# Altium footprint library Capacitor.PcbLib: 73 footprints (part 2 of 5)
Each footprint in its own frame and in the unit in brackets; x right, y up, seen from the top. Pads: shape width x height; smd on the part's side, far side on the other; paste and mask are expansions set on the pad; w line width, h text height; cw(c..) or ccw(c..) is an arc to the next point about the centre after c.
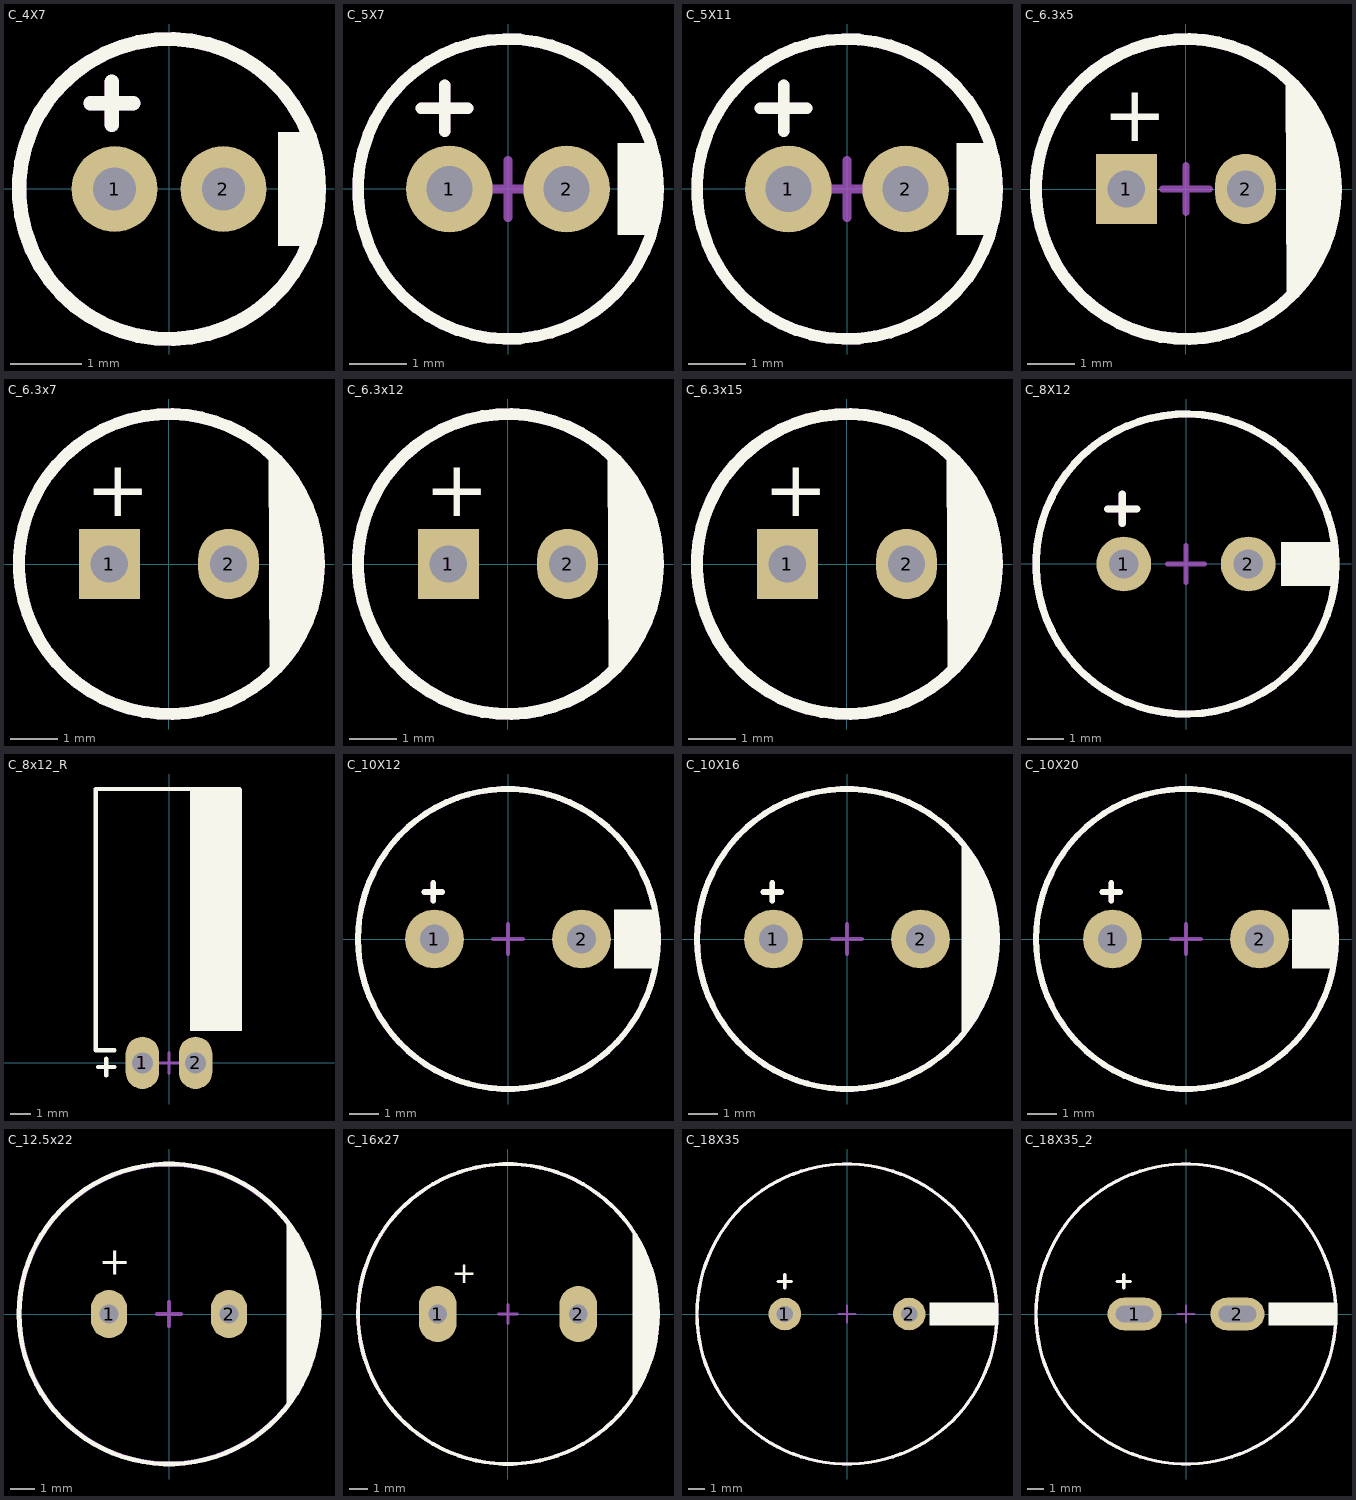
[diagram p1: the footprints below, top view; thin cyan lines are the x and y axes]

## C_4X7 [mm] "Cap Elec, D4.0X7.0H pitch: 1.5mm"
height 7
pads (2):
  round 1.2 hole 0.6: 1(-0.762,0) 2(0.762,0)
Top Overlay:
  circle w0.2: c0,0 r2.1
  rectangle: 1.524,-0.8 2.046,0.8
  lines w0.2: -1.1,1.2 -0.5,1.2 ; -0.8,0.9 -0.8,1.5
Top Designator:
  text ".Designator" at -3.71,-0.344 h1.52
Mechanical 15:
  circle w0.2: c0,0 r2.1
  lines w0.2: -1.1,1.2 -0.5,1.2 ; -0.8,0.9 -0.8,1.5
3D body "ElCapVT-1.5-4x7-black.step": height 7, standoff -3, extent -1.99,-1.99 2.001,1.99

## C_5X7 [mm] "Cap Elec, D5.0X7.0H pitch: 2mm"
height 7
pads (2):
  round 1.5 hole 0.8: 1(-1.016,0) 2(1.016,0)
Top Overlay:
  circle w0.2: c0,0 r2.6
  rectangle: 1.9,-0.8 2.54,0.8
  lines w0.2: -1.5,1.4 -0.7,1.4 ; -1.1,1 -1.1,1.8
Top Designator:
  text ".Designator" at -3.71,-0.344 h1.52
Mechanical 12:
  lines w0.15: -0.5,0 0.5,0 ; 0,-0.5 0,0.5
Mechanical 15:
  circle w0.2: c0,0 r2.6
  lines w0.2: -1.5,1.4 -0.7,1.4 ; -1.1,1 -1.1,1.8
3D body "ElCapVT-2.0-5x7-black.step": height 7.1, standoff -2.9, extent -2.5,-2.499 2.501,2.499

## C_5X11 [mm] "Cap Elec, D5.0X11.0H pitch: 2mm"
height 11
pads (2):
  round 1.5 hole 0.8: 1(-1.016,0) 2(1.016,0)
Top Overlay:
  circle w0.2: c0,0 r2.6
  rectangle: 1.9,-0.8 2.54,0.8
  lines w0.2: -1.5,1.4 -0.7,1.4 ; -1.1,1 -1.1,1.8
Top Designator:
  text ".Designator" at -3.71,-0.344 h1.52
Mechanical 12:
  lines w0.15: -0.5,0 0.5,0 ; 0,-0.5 0,0.5
Mechanical 15:
  circle w0.2: c0,0 r2.6
  lines w0.2: -1.5,1.4 -0.7,1.4 ; -1.1,1 -1.1,1.8
3D body "ElCapVT-2.0-5x11-black.step": height 11.01, standoff -2.99, extent -2.5,-2.499 2.501,2.499

## C_6.3x5 [mm] "pitch 2.5mm"
pads (2):
  rect 1.3x1.5 hole 0.8: 1(-1.27,0)
  oval 1.3x1.5 hole 0.8: 2(1.27,0)
Top Overlay:
  circle w0.254: c0,0 r3.2
  region: 2.147,-2.372 2.314,-2.222 2.601,-1.878 2.837,-1.497 3.018,-1.087 3.14,-0.655 3.201,-0.211 3.199,0.238 3.135,0.681 3.009,1.112 2.825,1.52 2.585,1.899 2.295,2.241 2.127,2.39
  text "+" at -1.778,1.016 h1.2
Top Designator:
  text ".Designator" at -3.71,-0.344 h1.52
Mechanical 12:
  lines w0.15: -0.5,0 0.5,0 ; 0,-0.5 0,0.5
Mechanical 15:
  circle w0.254: c0,0 r3.2
  text "+" at -1.778,1.016 h1.2
3D body "Aluminum_electrolytic_capacitor_radial_D6.3_H5_PinD0.5_Pitch2.5_nominal_black.step": height 5.05, standoff -2.95, extent -3.138,-3.142 3.138,3.142

## C_6.3x7 [mm] "pitch 2.5mm"
pads (2):
  rect 1.3x1.5 hole 0.8: 1(-1.27,0)
  oval 1.3x1.5 hole 0.8: 2(1.27,0)
Top Overlay:
  circle w0.254: c0,0 r3.2
  region: 2.147,-2.372 2.314,-2.222 2.601,-1.878 2.837,-1.497 3.018,-1.087 3.14,-0.655 3.201,-0.211 3.199,0.238 3.135,0.681 3.009,1.112 2.825,1.52 2.585,1.899 2.295,2.241 2.127,2.39
  text "+" at -1.778,1.016 h1.2
Top Designator:
  text ".Designator" at -3.71,-0.344 h1.52
Mechanical 15:
  circle w0.254: c0,0 r3.2
  text "+" at -1.778,1.016 h1.2
3D body "Aluminum_electrolytic_capacitor_radial_D6.3_H7_PinD0.5_Pitch2.5_nominal_black.step": height 7.05, standoff -2.95, extent -3.138,-3.142 3.138,3.142

## C_6.3x12 [mm] "pitch 2.5mm"
pads (2):
  rect 1.3x1.5 hole 0.8: 1(-1.27,0)
  oval 1.3x1.5 hole 0.8: 2(1.27,0)
Top Overlay:
  circle w0.254: c0,0 r3.2
  region: 2.147,-2.372 2.314,-2.222 2.601,-1.878 2.837,-1.497 3.018,-1.087 3.14,-0.655 3.201,-0.211 3.199,0.238 3.135,0.681 3.009,1.112 2.825,1.52 2.585,1.899 2.295,2.241 2.127,2.39
  text "+" at -1.778,1.016 h1.2
Top Designator:
  text ".Designator" at -3.71,-0.344 h1.52
Mechanical 15:
  circle w0.254: c0,0 r3.2
  text "+" at -1.778,1.016 h1.2
3D body "ElCapVT-2.5-6.3x12-black.step": height 12.05, standoff -2.95, extent -3.15,-3.15 3.151,3.15

## C_6.3x15 [mm] "pitch 2.5mm"
pads (2):
  rect 1.3x1.5 hole 0.8: 1(-1.27,0)
  oval 1.3x1.5 hole 0.8: 2(1.27,0)
Top Overlay:
  circle w0.254: c0,0 r3.2
  region: 2.147,-2.372 2.314,-2.222 2.601,-1.878 2.837,-1.497 3.018,-1.087 3.14,-0.655 3.201,-0.211 3.199,0.238 3.135,0.681 3.009,1.112 2.825,1.52 2.585,1.899 2.295,2.241 2.127,2.39
  text "+" at -1.778,1.016 h1.2
Top Designator:
  text ".Designator" at -3.71,-0.344 h1.52
Mechanical 15:
  circle w0.254: c0,0 r3.2
  text "+" at -1.778,1.016 h1.2
3D body "Aluminum_electrolytic_capacitor_radial_D6.3_H15_PinD0.5_Pitch2.5_nominal_black.step": height 15.05, standoff -2.95, extent -3.138,-3.142 3.138,3.142

## C_8X12 [mm] "Cap Elec, D8.0X12.0H pitch: 3.5mm, RB.14/.26, RB.15/.32"
height 12
pads (2):
  round 1.5 hole 0.8: 1(-1.7,0) 2(1.7,0)
Top Overlay:
  circle w0.2: c0,0 r4.1
  rectangle: 2.6,-0.6 4.1,0.6
  lines w0.2: -2.145,1.505 -1.345,1.505 ; -1.745,1.105 -1.745,1.905
Top Designator:
  text ".Designator" at -3.71,-0.344 h1.52
Mechanical 12:
  lines w0.15: -0.5,0 0.5,0 ; 0,-0.5 0,0.5
Mechanical 15:
  circle w0.2: c0,0 r4.1
  lines w0.2: -2.145,1.505 -1.345,1.505 ; -1.745,1.105 -1.745,1.905
3D body "User Library-Cap-EL(8x12-3_5)T.SLDPRT": height 12.3, standoff -3.3, extent -3.988,-3.989 4.002,3.989

## C_8x12_R [mm] "8x12"
pads (2):
  oval 1.6x2.5 hole 1: 1(-1.27,0) 2(1.27,0)
Top Overlay:
  rectangle: 1.016,1.524 3.5,13.1
  lines w0.2: -3.4,-0.2 -2.6,-0.2 ; -3,-0.6 -3,0.2 ; -2.6,0.6 -3.5,0.6 -3.5,13.1 3.371,13.1
Top Designator:
  text ".Designator" at -3.76,5.58 h1.52
Mechanical 12:
  lines w0.15: -0.5,0 0.5,0 ; 0,-0.5 0,0.5
3D body "CAPAE250P680X1220_FLAT1.STEP": height 6.8, standoff -1.78, extent -3.39,-0.248 3.39,12.952

## C_10X12 [mm] "Cap Elec, D10.0X12.0H pitch: 5.0mm"
height 12
pads (2):
  round 2 hole 1: 1(-2.5,0) 2(2.5,0)
Top Overlay:
  circle w0.2: c0,0 r5.1
  rectangle: 3.6,-1 5.1,1
  lines w0.2: -2.84,1.6 -2.24,1.6 ; -2.54,1.3 -2.54,1.9
Top Designator:
  text ".Designator" at -3.71,-0.344 h1.52
Mechanical 12:
  lines w0.15: -0.5,0 0.5,0 ; 0,-0.5 0,0.5
Mechanical 15:
  circle w0.2: c0,0 r5.1
  lines w0.2: -2.84,1.6 -2.24,1.6 ; -2.54,1.3 -2.54,1.9
3D body "ELE Radial 10x12.STEP": height 13.11, standoff -2.29, extent -5.075,-5.08 5.08,5.08

## C_10X16 [mm] "Cap Elec, D10.0X16.0H pitch: 5.0mm"
height 16
pads (2):
  round 2 hole 1: 1(-2.5,0) 2(2.5,0)
Top Overlay:
  circle w0.2: c0,0 r5.1
  region: 3.907,-3.278 3.907,3.278 4.098,3.051 4.424,2.554 4.691,2.023 4.894,1.465 5.031,0.887 5.1,0.297 5.1,-0.297 5.031,-0.887 4.894,-1.465 4.691,-2.023 4.424,-2.554 4.098,-3.051
  lines w0.2: -2.84,1.6 -2.24,1.6 ; -2.54,1.3 -2.54,1.9
Top Designator:
  text ".Designator" at -3.71,-0.344 h1.52
Top Assembly:
  circle w0.2: c0,0 r5.1
  lines w0.2: -2.84,1.6 -2.24,1.6 ; -2.54,1.3 -2.54,1.9
Mechanical 12:
  lines w0.15: -0.5,0 0.5,0 ; 0,-0.5 0,0.5
3D body "ElCapVT-5.0-10x16-black.step": height 16.1, standoff -2.9, extent -5,-4.997 5.001,4.997

## C_10X20 [mm] "Cap Elec, D10.0X20.0H pitch: 5.0mm, RB.2/.4"
height 20
pads (2):
  round 2 hole 1: 1(-2.5,0) 2(2.5,0)
Top Overlay:
  circle w0.2: c0,0 r5.1
  rectangle: 3.6,-1 5.1,1
  lines w0.2: -2.84,1.6 -2.24,1.6 ; -2.54,1.3 -2.54,1.9
Top Designator:
  text ".Designator" at -3.71,-0.344 h1.52
Mechanical 12:
  lines w0.15: -0.5,0 0.5,0 ; 0,-0.5 0,0.5
Mechanical 15:
  circle w0.2: c0,0 r5.1
  lines w0.2: -2.84,1.6 -2.24,1.6 ; -2.54,1.3 -2.54,1.9
3D body "ElCapVT-5.0-10x20-black.step": height 20.05, standoff -2.95, extent -5,-4.997 5.001,4.997

## C_12.5x22 [mm] "5MM Lead Spacing"
height 22
pads (2):
  oval 1.5x2 hole 0.8: 1(-2.5,0) 2(2.5,0)
Top Overlay:
  circle w0.2: c0,0 r6.25
  region: 5,-3.75 5,3.75 5.75,2.5 6.25,1 6.25,0 6,-1.5 5.75,-2.5
  lines w0.2: 5,-3.75 5,3.75
  text "+" at -2.922,1.25 h2
Top Designator:
  text ".Designator" at -3.71,-0.344 h1.52
Mechanical 12:
  lines w0.15: -0.5,0 0.5,0 ; 0,-0.5 0,0.5
Mechanical 15:
  circle w0.2: c0,0 r6.241
  text "+" at -2.922,1.25 h2
3D body "CAP ALTH D-12.5MM L-5.0MM H-22MM.STEP": height 22.2, standoff -3, extent -6.25,-6.246 6.25,6.246

## C_16x27 [mm] "7.5MM Lead Spacing"
height 27
pads (2):
  oval 2x3 hole 1: 1(-3.75,0) 2(3.75,0)
Top Overlay:
  circle w0.2: c0,0 r8
  region: 6.75,-4.25 6.75,4.25 7.5,2.75 8,1 8,0 7.75,-1.75 7.5,-2.75
  lines w0.2: 6.75,-4.25 6.75,4.25
  text "+" at -3,1.25 h2
Top Designator:
  text ".Designator" at -3.71,-0.344 h1.52
Mechanical 12:
  lines w0.15: -0.5,0 0.5,0 ; 0,-0.5 0,0.5
Mechanical 15:
  circle w0.2: c0,0 r8
  text "+" at -3,1.25 h2
3D body "CAP ALTH D-16MM L-7.5MM H-27MM .STEP": height 27.2, standoff -3, extent -8,-7.996 8,7.997

## C_18X35 [mm] "Cap Elec, D18X35H pitch: 7.6mm, RB.3/.7"
pads (2):
  round 2 hole 1: 1(-3.81,0) 2(3.81,0)
Top Overlay:
  circle w0.2: c0,0 r9.2
  rectangle: 5.07,-0.7 9.2,0.7
  lines w0.2: -4.21,2 -3.41,2 ; -3.81,1.6 -3.81,2.4
Top Designator:
  text ".Designator" at -3.71,-0.344 h1.52
Mechanical 12:
  lines w0.15: -0.5,0 0.5,0 ; 0,-0.5 0,0.5
Mechanical 15:
  circle w0.2: c0,0 r9.2
  lines w0.2: -4.21,2 -3.41,2 ; -3.81,1.6 -3.81,2.4
3D body "ElCapVT-7.5-18x35-black.step": height 35, standoff -3, extent -8.981,-8.987 9.001,8.987

## C_18X35_2 [mm] "Cap Elec, D18X35H pitch: 7.6mm, 5mm, RB.3/.7"
pads (2):
  oval 3.31x2 hole 1 slot 2.31 at 0 deg: 1(-3.155,0) 2(3.155,0)
Top Overlay:
  circle w0.2: c0,0 r9.2
  rectangle: 5.07,-0.7 9.2,0.7
  lines w0.2: -4.21,2 -3.41,2 ; -3.81,1.6 -3.81,2.4
Top Designator:
  text ".Designator" at -3.71,-0.344 h1.52
Mechanical 12:
  lines w0.15: -0.5,0 0.5,0 ; 0,-0.5 0,0.5
Mechanical 15:
  circle w0.2: c0,0 r9.2
  lines w0.2: -4.21,2 -3.41,2 ; -3.81,1.6 -3.81,2.4
3D body "ElCapVT-7.5-18x35-black.step": height 35, standoff -3, extent -8.981,-8.987 9.001,8.987